# Altium footprint library Gateway_Academic.PcbLib: 49 footprints (part 2 of 4)
Each footprint in its own frame and in the unit in brackets; x right, y up, seen from the top. Pads: shape width x height; smd on the part's side, far side on the other; paste and mask are expansions set on the pad; w line width, h text height; cw(c..) or ccw(c..) is an arc to the next point about the centre after c.
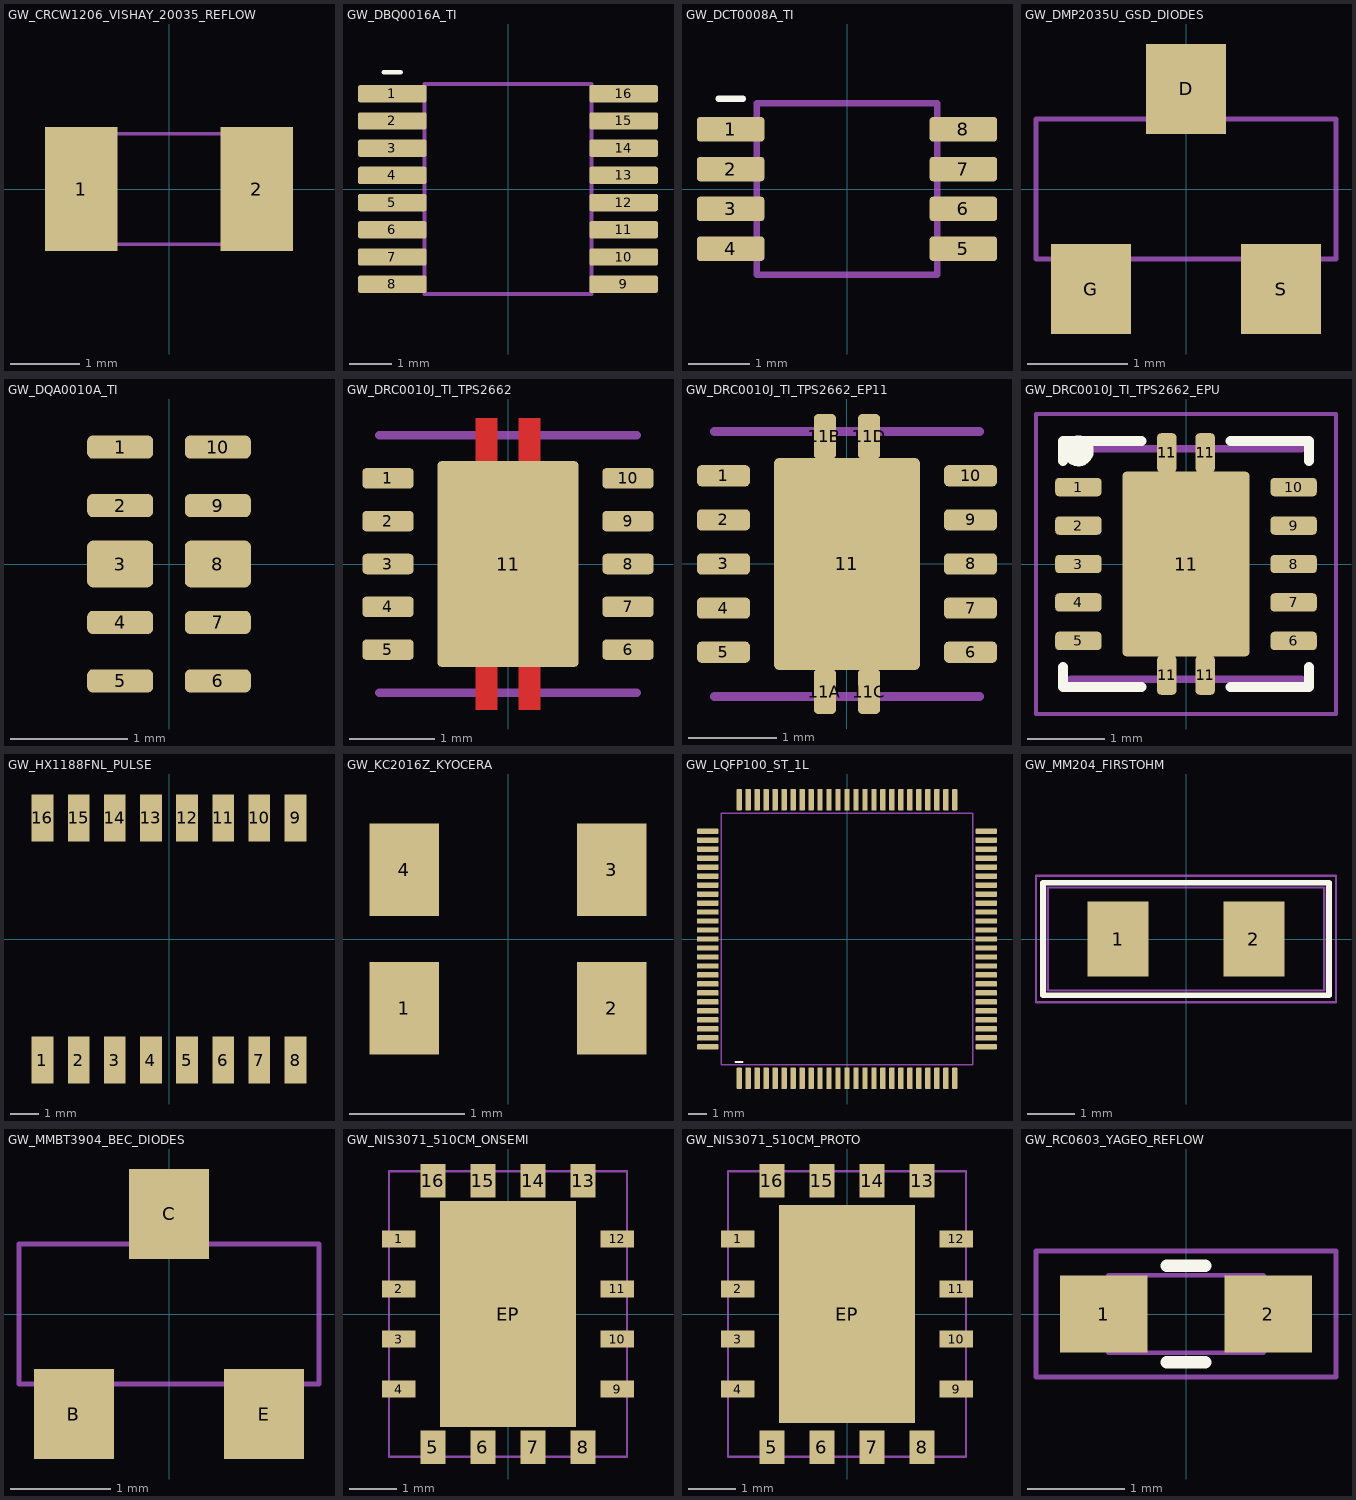
[diagram p1: the footprints below, top view; thin cyan lines are the x and y axes]

## GW_CRCW1206_VISHAY_20035_REFLOW [mm] "Vishay20035p9 REFLOW1206 G1.50 Y1.05 X1.80 Z3.60mm;centres2.55mm;body3.2x1.6mm. Mask+.05/paste1:1 prototype process."
pads (2):
  rect 1.05x1.8 smd paste+0 mask+0.05: 1(-1.275,0) 2(1.275,0)
Mechanical 1:
  lines w0.05: -1.6,-0.8 1.6,-0.8 1.6,0.8 -1.6,0.8 -1.6,-0.8

## GW_DBQ0016A_TI [mil] "SLLSEY7G table4-2 p4; DBQ0016A 4214846/A PDF pp44-46;"
pads (16):
  rrect25% 63x16 smd paste+0 mask+2: 1(-106.3,87.5) 2(-106.3,62.5) 3(-106.3,37.5) 4(-106.3,12.5) 5(-106.3,-12.5) 6(-106.3,-37.5) 7(-106.3,-62.5) 8(-106.3,-87.5) 9(106.3,-87.5) 10(106.3,-62.5) 11(106.3,-37.5) 12(106.3,-12.5) 13(106.3,12.5) 14(106.3,37.5) 15(106.3,62.5) 16(106.3,87.5)
Top Overlay:
  lines w3.94: -114.17,107.31 -98.43,107.31
  text ".Designator" at 0,119.12 h39.37
Mechanical 1:
  lines w3.94: -76.77,-96.46 76.77,-96.46 76.77,96.46 -76.77,96.46 -76.77,-96.46

## GW_DCT0008A_TI [mm] "SCES516N table4-1 p2; DCT0008A 4220784/D PDF pp28-30;"
pads (8):
  rrect25% 1.1x0.4 smd paste+0 mask+0.07: 1(-1.9,0.975) 2(-1.9,0.325) 3(-1.9,-0.325) 4(-1.9,-0.975) 5(1.9,-0.975) 6(1.9,-0.325) 7(1.9,0.325) 8(1.9,0.975)
Top Overlay:
  lines w0.1: -2.1,1.475 -1.7,1.475
  text ".Designator" at 0,1.775 h1
Mechanical 1:
  lines w0.1: -1.475,-1.4 1.475,-1.4 1.475,1.4 -1.475,1.4 -1.475,-1.4

## GW_DMP2035U_GSD_DIODES [mm] "Diodes DS31830 Rev11-2 June2025 p1 top view/order,p2 electrical,p6 suggested lands; lower-left B/G,lower-right E/S,upper C/D; functional IDs intentional. C2.0 X.8 X1=1.35 Y.9 Y1=2.9mm; mask+.05,paste1:1."
pads (3):
  rect 0.8x0.9 smd paste+0 mask+0.05: D(0,1) G(-0.95,-1) S(0.95,-1)
Mechanical 1:
  lines w0.05: -1.5,-0.7 1.5,-0.7 1.5,0.7 -1.5,0.7 -1.5,-0.7

## GW_DQA0010A_TI [mm] "TI SLVSBO7O DQA0010A board/stencil pp29-30;0.565x0.2 leads,3/8=0.565x0.4;pitch0.5,row0.835mm. R0.05typ usingAltiumhalf-side50/25percent,NSMD+.05. GNDpaste0.565x0.36 windows,0.10mm stencil."
pads (10):
  rrect50% 0.565x0.2 smd paste+0 mask+0.05: 1(-0.417,1) 2(-0.417,0.5) 4(-0.417,-0.5) 5(-0.417,-1) 6(0.417,-1) 7(0.417,-0.5) 9(0.417,0.5) 10(0.417,1)
  rrect25% 0.565x0.4 smd paste-1 mask+0.05: 3(-0.417,0) 8(0.417,0)
Top Paste:
  region: -0.135,0.13 -0.136,0.14 -0.139,0.149 -0.143,0.158 -0.15,0.165 -0.157,0.172 -0.166,0.176 -0.175,0.179 -0.185,0.18 -0.65,0.18 -0.66,0.179 -0.669,0.176 -0.678,0.172 -0.685,0.165 -0.692,0.158 -0.696,0.149 -0.699,0.14 -0.7,0.13 -0.7,-0.13 -0.699,-0.14 -0.696,-0.149 -0.692,-0.158 -0.685,-0.165 -0.678,-0.172 -0.669,-0.176 -0.66,-0.179 -0.65,-0.18 -0.185,-0.18 -0.175,-0.179 -0.166,-0.176 -0.157,-0.172 -0.15,-0.165 -0.143,-0.158 -0.139,-0.149 -0.136,-0.14 -0.135,-0.13
  region: 0.7,0.13 0.699,0.14 0.696,0.149 0.692,0.158 0.685,0.165 0.678,0.172 0.669,0.176 0.66,0.179 0.65,0.18 0.185,0.18 0.175,0.179 0.166,0.176 0.157,0.172 0.15,0.165 0.143,0.158 0.139,0.149 0.136,0.14 0.135,0.13 0.135,-0.13 0.136,-0.14 0.139,-0.149 0.143,-0.158 0.15,-0.165 0.157,-0.172 0.166,-0.176 0.175,-0.179 0.185,-0.18 0.65,-0.18 0.66,-0.179 0.669,-0.176 0.678,-0.172 0.685,-0.165 0.692,-0.158 0.696,-0.149 0.699,-0.14 0.7,-0.13

## GW_DRC0010J_TI_TPS2662 [mm] "TI TPS2662 SLVSDT4F Dec2021 Table6-1 p4; DRC0010J4218878/B board p44/stencil p45; CAD_CANDIDATE: EP11 extensions require native custom-pad conversion/net inheritance; RTN only;Altium radius=percent*min(width,height)/200:lead42%,EP6%,finger40%;Rabout0.05mm."
pads (11):
  rrect42% 0.6x0.24 smd paste+0 mask+0.05: 1(-1.4,1) 2(-1.4,0.5) 3(-1.4,0) 4(-1.4,-0.5) 5(-1.4,-1) 6(1.4,-1) 7(1.4,-0.5) 8(1.4,0) 9(1.4,0.5) 10(1.4,1)
  rrect6% 1.65x2.4 smd paste-1 mask+0.05: 11(0,0)
Top Layer:
  region: -0.375,-1.7 -0.125,-1.7 -0.125,-1.2 -0.375,-1.2
  region: -0.375,1.2 -0.125,1.2 -0.125,1.7 -0.375,1.7
  region: 0.125,-1.7 0.375,-1.7 0.375,-1.2 0.125,-1.2
  region: 0.125,1.2 0.375,1.2 0.375,1.7 0.125,1.7
Top Paste:
  rectangle: -0.75,-1.16 0.75,-0.1
  rectangle: -0.75,0.1 0.75,1.16
  rectangle: -0.375,-1.7 -0.125,-1.36
  rectangle: -0.375,1.36 -0.125,1.7
  rectangle: 0.125,-1.7 0.375,-1.36
  rectangle: 0.125,1.36 0.375,1.7
Top Solder:
  rectangle: -0.425,-1.75 -0.075,-1.15
  rectangle: -0.425,1.15 -0.075,1.75
  rectangle: 0.075,-1.75 0.425,-1.15
  rectangle: 0.075,1.15 0.425,1.75
Mechanical 1:
  lines w0.1: -1.5,-1.5 1.5,-1.5 ; -1.5,1.5 1.5,1.5

## GW_DRC0010J_TI_TPS2662_EP11 [mm] "TI SLVSDT4F DRC0010J pp43-45; exact copper union central11+segment aliases11A/B/C/D. REQUIRED one-to-many model mapping: symbol11=>pads11,11A,11B,11C,11D; allEF_RTN. CANDIDATE until native mapping/transfer verified. Never bind by default1:1 mapping.;Altium radius=percent*min(width,height)/200:lead42%,EP6%,finger40%;Rabout0.05mm."
pads (15):
  rrect42% 0.6x0.24 smd paste+0 mask+0.05: 1(-1.4,1) 2(-1.4,0.5) 3(-1.4,0) 4(-1.4,-0.5) 5(-1.4,-1) 6(1.4,-1) 7(1.4,-0.5) 8(1.4,0) 9(1.4,0.5) 10(1.4,1)
  rrect6% 1.65x2.4 smd paste-1 mask+0.05: 11(0,0)
  rrect40% 0.25x0.51 smd paste-1 mask+0.05: 11A(-0.25,-1.445) 11B(-0.25,1.445) 11C(0.25,-1.445) 11D(0.25,1.445)
Top Paste:
  rectangle: -0.75,-1.16 0.75,-0.1
  rectangle: -0.75,0.1 0.75,1.16
  rectangle: -0.375,-1.7 -0.125,-1.36
  rectangle: -0.375,1.36 -0.125,1.7
  rectangle: 0.125,-1.7 0.375,-1.36
  rectangle: 0.125,1.36 0.375,1.7
Mechanical 1:
  lines w0.1: -1.5,-1.5 1.5,-1.5 ; -1.5,1.5 1.5,1.5

## GW_DRC0010J_TI_TPS2662_EPU [mm] "TI SLVSDT4F DRC0010J pp43-45 copper of GW_DRC0010J_TI_TPS2662_EP11 with EP segments 11A-11D renamed to 11 so all five EP copper pieces inherit pin 11 (RTN_EP / EF_RTN) through same-designator pads."
pads (15):
  rrect42% 0.6x0.24 smd paste+0 mask+0.05: 1(-1.4,1) 2(-1.4,0.5) 3(-1.4,0) 4(-1.4,-0.5) 5(-1.4,-1) 6(1.4,-1) 7(1.4,-0.5) 8(1.4,0) 9(1.4,0.5) 10(1.4,1)
  rrect40% 0.25x0.51 smd paste-1 mask+0.05: 11(-0.25,-1.445) 11(-0.25,1.445) 11(0.25,-1.445) 11(0.25,1.445)
  rrect6% 1.65x2.4 smd paste-1 mask+0.05: 11(0,0)
Top Overlay:
  circle w0.2: c-1.4,1.47 r0.1
  lines w0.127: -1.6,-1.34 -1.6,-1.6 -0.58,-1.6 ; -1.6,1.34 -1.6,1.6 -0.58,1.6 ; 0.58,-1.6 1.6,-1.6 1.6,-1.34 ; 0.58,1.6 1.6,1.6 1.6,1.34
Top Paste:
  rectangle: -0.75,-1.16 0.75,-0.1
  rectangle: -0.75,0.1 0.75,1.16
  rectangle: -0.375,-1.7 -0.125,-1.36
  rectangle: -0.375,1.36 -0.125,1.7
  rectangle: 0.125,-1.7 0.375,-1.36
  rectangle: 0.125,1.36 0.375,1.7
Mechanical 1:
  lines w0.1: -1.5,-1.5 1.5,-1.5 ; -1.5,1.5 1.5,1.5
Mechanical 15:
  lines w0.05: -1.95,-1.95 1.95,-1.95 1.95,1.95 -1.95,1.95 -1.95,-1.95
3D body: height 1, standoff 0, extent -1.5,-1.5 1.5,1.5

## GW_HX1188FNL_PULSE [mil] "Pulse HX1188FNL revB 30-May-2014 sheets2-3 PS-2005.002-D; 16 lands; 1.27mm pitch, .762x1.651mm; row centers +/-4.2545mm. No metal-under-transformer keepout encoded: board gate."
pads (16):
  rect 30x65 smd: 1(-175,-167.5) 2(-125,-167.5) 3(-75,-167.5) 4(-25,-167.5) 5(25,-167.5) 6(75,-167.5) 7(125,-167.5) 8(175,-167.5) 9(175,167.5) 10(125,167.5) 11(75,167.5) 12(25,167.5) 13(-25,167.5) 14(-75,167.5) 15(-125,167.5) 16(-175,167.5)

## GW_KC2016Z_KYOCERA [mm] "Kyocera TNY1T-H1-DEX01-11 17-Jul-2026 pp4,6 table2 fig4; Top view derived by mirroring numbered bottom view; 1=STANDBY,2=GND,3=OUT,4=VCC; no crystal load pads."
pads (4):
  rect 0.6x0.8 smd: 1(-0.9,-0.6) 2(0.9,-0.6) 3(0.9,0.6) 4(-0.9,0.6)

## GW_LQFP100_ST_1L [mm] "DS13313 Rev5 fig5, table7 pp57-71, fig65 p218 (PDF p219); Copper matches ST fig65; mask +0.05mm and 1:1 paste are explicit engineering choices, assembly/fab review pending, not manufacturer-qualified mask/stencil."
pads (100):
  rrect33% 0.3x1.2 smd paste+0 mask+0.05: 1(-6,-7.75) 2(-5.5,-7.75) 3(-5,-7.75) 4(-4.5,-7.75) 5(-4,-7.75) 6(-3.5,-7.75) 7(-3,-7.75) 8(-2.5,-7.75) 9(-2,-7.75) 10(-1.5,-7.75) 11(-1,-7.75) 12(-0.5,-7.75) 13(0,-7.75) 14(0.5,-7.75) 15(1,-7.75) 16(1.5,-7.75) 17(2,-7.75) 18(2.5,-7.75) 19(3,-7.75) 20(3.5,-7.75) 21(4,-7.75) 22(4.5,-7.75) 23(5,-7.75) 24(5.5,-7.75) 25(6,-7.75) 51(6,7.75) 52(5.5,7.75) 53(5,7.75) 54(4.5,7.75) 55(4,7.75) 56(3.5,7.75) 57(3,7.75) 58(2.5,7.75) 59(2,7.75) 60(1.5,7.75) 61(1,7.75) 62(0.5,7.75) 63(0,7.75) 64(-0.5,7.75) 65(-1,7.75) 66(-1.5,7.75) 67(-2,7.75) 68(-2.5,7.75) 69(-3,7.75) 70(-3.5,7.75) 71(-4,7.75) 72(-4.5,7.75) 73(-5,7.75) 74(-5.5,7.75) 75(-6,7.75)
  rrect33% 1.2x0.3 smd paste+0 mask+0.05: 26(7.75,-6) 27(7.75,-5.5) 28(7.75,-5) 29(7.75,-4.5) 30(7.75,-4) 31(7.75,-3.5) 32(7.75,-3) 33(7.75,-2.5) 34(7.75,-2) 35(7.75,-1.5) 36(7.75,-1) 37(7.75,-0.5) 38(7.75,0) 39(7.75,0.5) 40(7.75,1) 41(7.75,1.5) 42(7.75,2) 43(7.75,2.5) 44(7.75,3) 45(7.75,3.5) 46(7.75,4) 47(7.75,4.5) 48(7.75,5) 49(7.75,5.5) 50(7.75,6) 76(-7.75,6) 77(-7.75,5.5) 78(-7.75,5) 79(-7.75,4.5) 80(-7.75,4) 81(-7.75,3.5) 82(-7.75,3) 83(-7.75,2.5) 84(-7.75,2) 85(-7.75,1.5) 86(-7.75,1) 87(-7.75,0.5) 88(-7.75,0) 89(-7.75,-0.5) 90(-7.75,-1) 91(-7.75,-1.5) 92(-7.75,-2) 93(-7.75,-2.5) 94(-7.75,-3) 95(-7.75,-3.5) 96(-7.75,-4) 97(-7.75,-4.5) 98(-7.75,-5) 99(-7.75,-5.5) 100(-7.75,-6)
Top Overlay:
  lines w0.1: -6.2,-6.85 -5.8,-6.85
  text ".Designator" at 0,8.95 h1
Mechanical 1:
  lines w0.1: -7,-7 7,-7 7,7 -7,7 -7,-7

## GW_MM204_FIRSTOHM [mm] "Firstohm MM rev08-March-2023 printedpp75-78; p78 reflow pad table MM16/MM204; Reflow minimum lands1.3x1.6, inner spacing1.6mm; nonpolar numbering project1/2. Pulse qualification separate."
pads (2):
  rect 1.3x1.6 smd: 1(-1.45,0) 2(1.45,0)
Top Overlay:
  lines w0.127: -3.05,-1.2 3.05,-1.2 3.05,1.2 -3.05,1.2 -3.05,-1.2
Mechanical 1:
  lines w0.05: -2.95,-1.1 2.95,-1.1 2.95,1.1 -2.95,1.1 -2.95,-1.1
Mechanical 15:
  lines w0.05: -3.2,-1.35 3.2,-1.35 3.2,1.35 -3.2,1.35 -3.2,-1.35
3D body: height 2.2, standoff 0, extent -2.95,-1.1 2.95,1.1

## GW_MMBT3904_BEC_DIODES [mm] "Diodes DS30036 Rev27-2 March2025 p1 top view/order, p3 electrical, p6 suggested lands; lower-left B/G,lower-right E/S,upper C/D; functional IDs intentional. C2.0 X.8 X1=1.35 Y.9 Y1=2.9mm; mask+.05,paste1:1."
pads (3):
  rect 0.8x0.9 smd paste+0 mask+0.05: B(-0.95,-1) C(0,1) E(0.95,-1)
Mechanical 1:
  lines w0.05: -1.5,-0.7 1.5,-0.7 1.5,0.7 -1.5,0.7 -1.5,-0.7

## GW_NIS3071_510CM_ONSEMI [mm] "onsemi NIS3071/D Rev3 Apr2026 table1 p2; CASE510CM 98AON08122H IssueO p12; Top-view CCW1..16; side .71x.35; ends .52x.70; pitch1.05; extents5.30x6.30. EP2.85x4.75 is GND; EP is project identifier for unnumbered PAD. Stencil/vias/thermal design pending."
pads (17):
  rect 0.71x0.35 smd: 1(-2.295,1.575) 2(-2.295,0.525) 3(-2.295,-0.525) 4(-2.295,-1.575) 9(2.295,-1.575) 10(2.295,-0.525) 11(2.295,0.525) 12(2.295,1.575)
  rect 0.52x0.7 smd: 5(-1.575,-2.8) 6(-0.525,-2.8) 7(0.525,-2.8) 8(1.575,-2.8) 13(1.575,2.8) 14(0.525,2.8) 15(-0.525,2.8) 16(-1.575,2.8)
  rect 2.85x4.75 smd: EP(0,0)
Mechanical 1:
  lines w0.05: -2.5,-3 2.5,-3 2.5,3 -2.5,3 -2.5,-3

## GW_NIS3071_510CM_PROTO [mm] "NIS3071 CASE510CM reference perimeter pads. Prototype DFM variant: groundEP2.85x4.58 instead4.75; coppergap.160,maskbridge.110 with+.025mask. Four1.10x1.80paste windows60.7%. Max bodyEP4.65 overhangs land.035 each end;98.5% overlap. Engineering choice, not manufacturer-exact land."
pads (17):
  rect 0.71x0.35 smd paste+0 mask+0.025: 1(-2.295,1.575) 2(-2.295,0.525) 3(-2.295,-0.525) 4(-2.295,-1.575) 9(2.295,-1.575) 10(2.295,-0.525) 11(2.295,0.525) 12(2.295,1.575)
  rect 0.52x0.7 smd paste+0 mask+0.025: 5(-1.575,-2.8) 6(-0.525,-2.8) 7(0.525,-2.8) 8(1.575,-2.8) 13(1.575,2.8) 14(0.525,2.8) 15(-0.525,2.8) 16(-1.575,2.8)
  rect 2.85x4.58 smd paste-2 mask+0.025: EP(0,0)
Top Paste:
  rectangle: -1.2,-1.9 -0.1,-0.1
  rectangle: -1.2,0.1 -0.1,1.9
  rectangle: 0.1,-1.9 1.2,-0.1
  rectangle: 0.1,0.1 1.2,1.9
Mechanical 1:
  lines w0.05: -2.5,-3 2.5,-3 2.5,3 -2.5,3 -2.5,-3

## GW_RC0603_YAGEO_REFLOW [mm] "Yageo Mounting13-Feb-2018 V10 p4 Fig4/Table1; exact62k/15k manufacturer spec sheets; A2.6 overall,B.8 innergap,C.9 padwidth,D.8 padheight; no generic0603 default."
pads (2):
  rect 0.9x0.8 smd paste+0 mask+0.025: 1(-0.85,0) 2(0.85,0)
Top Overlay:
  lines w0.127: -0.2,-0.5 0.2,-0.5 ; -0.2,0.5 0.2,0.5
Mechanical 1:
  lines w0.05: -0.8,-0.4 0.8,-0.4 0.8,0.4 -0.8,0.4 -0.8,-0.4
Mechanical 15:
  lines w0.05: -1.55,-0.65 1.55,-0.65 1.55,0.65 -1.55,0.65 -1.55,-0.65
3D body: height 0.55, standoff 0, extent -0.8,-0.4 0.8,0.4